# Altium footprint library Conectores.PcbLib: 55 footprints (part 1 of 4)
Each footprint in its own frame and in the unit in brackets; x right, y up, seen from the top. Pads: shape width x height; smd on the part's side, far side on the other; paste and mask are expansions set on the pad; w line width, h text height; cw(c..) or ccw(c..) is an arc to the next point about the centre after c.
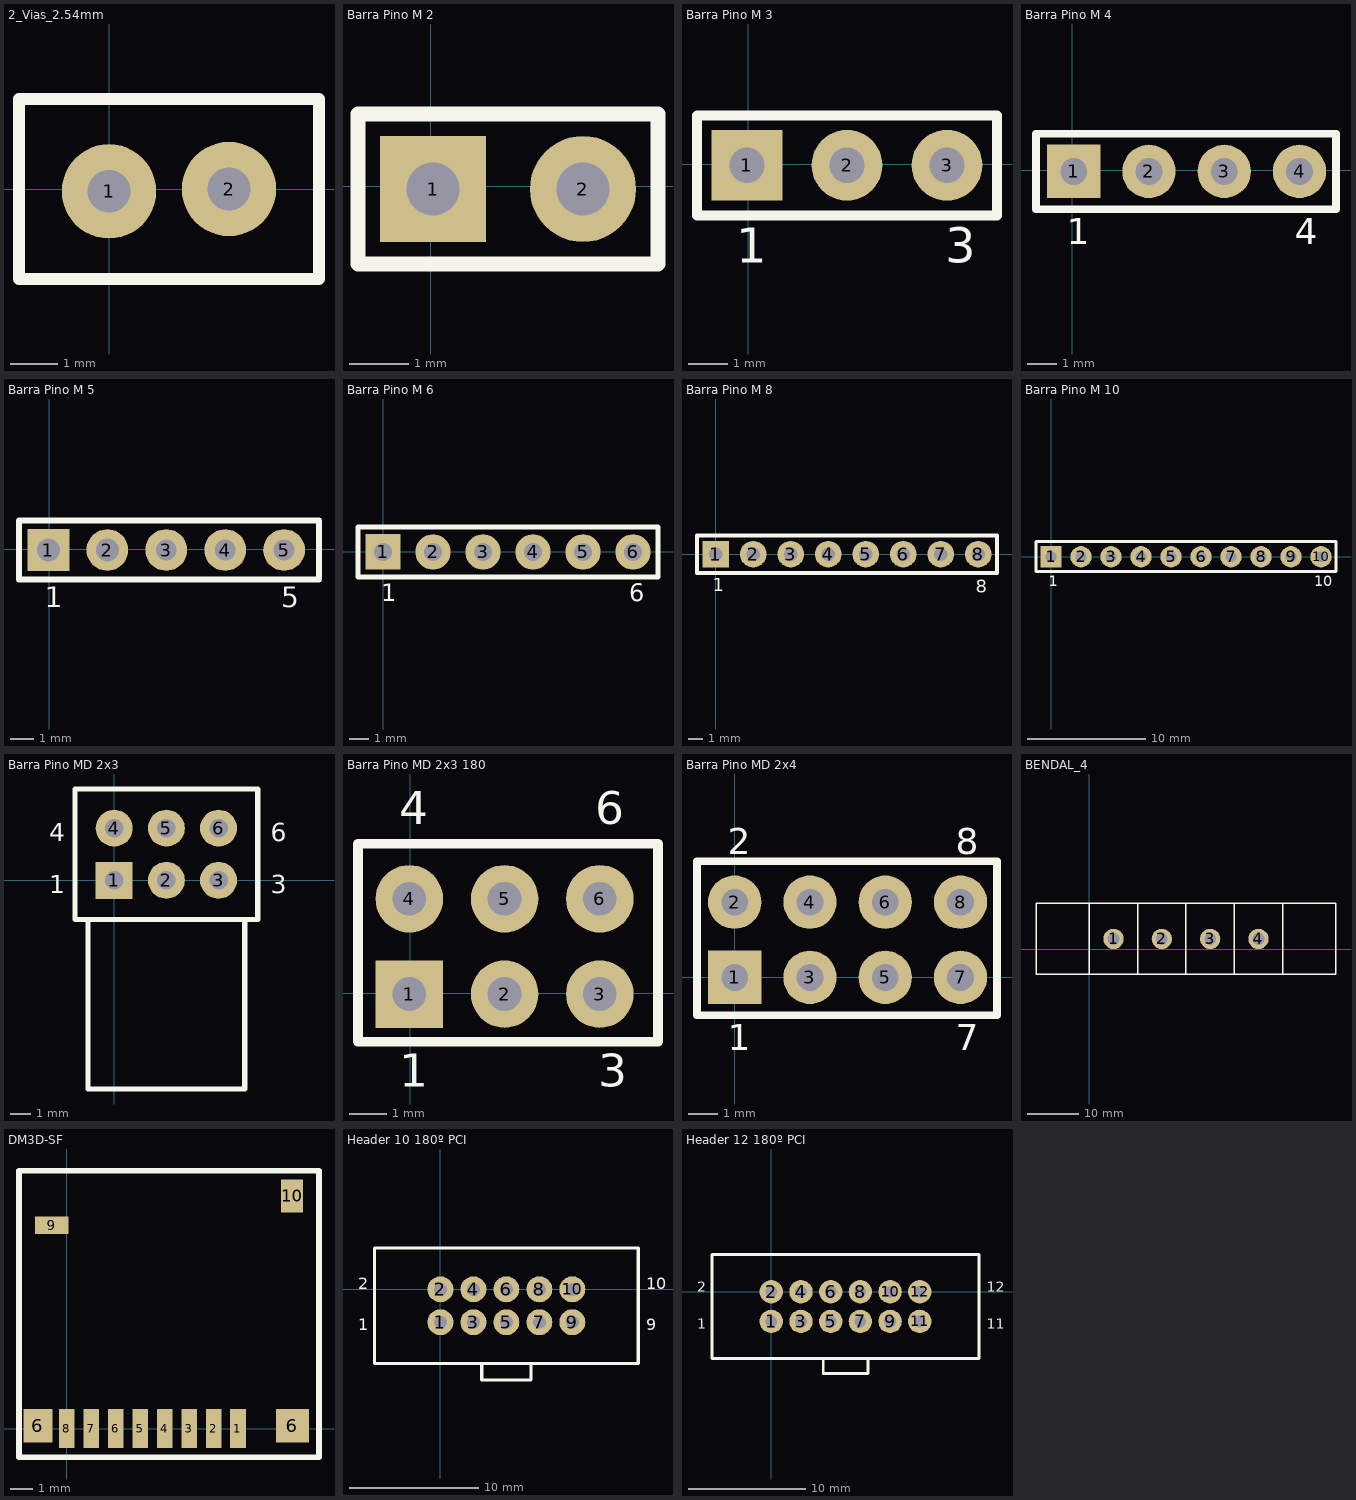
[diagram p0: the footprints below, top view; thin cyan lines are the x and y axes]

## 2_Vias_2.54mm [mm]
pads (2):
  round 2 hole 0.9: 1(0,-0.05) 2(2.54,0)
Top Overlay:
  lines w0.254: -1.905,-1.905 4.445,-1.905 4.445,1.905 -1.905,1.905 -1.905,-1.905

## Barra Pino M 2 [mm] "Barra Pinos Macho 2 Vias 2.54mm"
pads (2):
  rect 1.8x1.8 hole 0.9: 1(0.039,-0.044)
  round 1.8 hole 0.9: 2(2.579,-0.044)
Top Overlay:
  lines w0.254: -1.231,-1.314 3.849,-1.314 3.849,1.226 -1.231,1.226 -1.231,-1.314
3D body "HDR-M-1x2-2.54mm-180-11.6mm.stp": height 8.6, standoff -3, extent -1.129,-1.268 3.951,1.231

## Barra Pino M 3 [mm] "Barra Pino Macho 3 Vias 2.54mm"
pads (3):
  rect 1.8x1.8 hole 0.9: 1(-0.031,-0.025)
  round 1.8 hole 0.9: 2(2.509,-0.025) 3(5.049,-0.025)
Top Overlay:
  lines w0.254: -1.301,-1.295 6.319,-1.295 6.319,1.245 -1.301,1.245 -1.301,-1.295
  text "3" at 5,-2.5 h0.89
  text "1" at -0.3,-2.5 h0.89
3D body "HDR-M-1x3-2.54mm-180-11.6mm.stp": height 8.6, standoff -3, extent -1.199,-1.249 6.421,1.25

## Barra Pino M 4 [mm] "Barra Pinos Macho 4 Vias 2.54mm"
pads (4):
  rect 1.8x1.8 hole 0.9: 1(0.039,-0.044)
  round 1.8 hole 0.9: 2(2.579,-0.044) 3(5.119,-0.044) 4(7.659,-0.044)
Top Overlay:
  lines w0.254: -1.231,-1.314 -1.231,1.226 8.89,1.226 8.89,-1.314 -1.231,-1.314
  text "4" at 7.5,-2.5 h0.89
  text "1" at -0.2,-2.5 h0.89
3D body "HDR-M-1x2-2.54mm-180-11.6mm.stp": height 8.6, standoff -3, extent -1.129,-1.268 3.951,1.231
3D body "HDR-M-1x2-2.54mm-180-11.6mm.stp": height 8.6, standoff -3, extent 3.951,-1.268 9.031,1.231

## Barra Pino M 5 [mm] "Barra Pino Macho 5 Vias 2.54mm"
pads (5):
  rect 1.8x1.8 hole 1: 1(-0.031,-0.025)
  round 1.8 hole 1: 2(2.509,-0.025)
  round 1.8 hole 0.9: 3(5.049,-0.025) 4(7.589,-0.025) 5(10.129,-0.025)
Top Overlay:
  lines w0.254: -1.301,-1.295 11.633,-1.295 11.633,1.245 -1.301,1.245 -1.301,-1.295
  text "5" at 10,-2.5 h0.89
  text "1" at -0.2,-2.5 h0.89
3D body "HDR-M-1x2-2.54mm-180-11.6mm.stp": height 8.6, standoff -3, extent 6.401,-1.275 11.481,1.224
3D body "HDR-M-1x3-2.54mm-180-11.6mm.stp": height 8.6, standoff -3, extent -1.199,-1.249 6.421,1.25

## Barra Pino M 6 [mm] "Barra Pino Macho 6 Vias 2.54mm"
pads (6):
  rect 1.8x1.8 hole 0.9 unplated: 1(0,0)
  round 1.8 hole 0.9 unplated: 2(2.54,0) 3(5.08,0) 4(7.62,0) 5(10.16,0) 6(12.7,0)
Top Overlay:
  lines w0.254: -1.27,-1.27 13.97,-1.27 13.97,1.27 -1.27,1.27 -1.27,-1.27
  text "6" at 12.5,-2.5 h0.89
  text "1" at -0.1,-2.5 h0.89
3D body "User Library-Header_Male_6Pin.STEP": height 9.04, standoff -2.5, extent -1.27,-1.245 13.97,1.245

## Barra Pino M 8 [mm] "Barra Pino Macho 8 Vias 2.54mm"
pads (8):
  rect 1.8x1.8 hole 0.9 unplated: 1(0,0)
  round 1.8 hole 0.9 unplated: 2(2.54,0) 3(5.08,0) 4(7.62,0) 5(10.16,0) 6(12.7,0) 7(15.24,0) 8(17.78,0)
Top Overlay:
  lines w0.254: -1.27,-1.27 19.05,-1.27 19.05,1.27 -1.27,1.27 -1.27,-1.27
  text "1" at -0.2,-2.5 h0.89
  text "8" at 17.6,-2.6 h0.89
3D body "User Library-Header_Male_8Pin.STEP": height 9.04, standoff -2.5, extent -1.27,-1.245 19.05,1.245

## Barra Pino M 10 [mm] "Barra Pino Macho 10 Vias 2.54mm"
pads (10):
  rect 1.8x1.8 hole 0.9 unplated: 1(0,0)
  round 1.8 hole 0.9 unplated: 2(2.54,0) 3(5.08,0) 4(7.62,0) 5(10.16,0) 6(12.7,0) 7(15.24,0) 8(17.78,0) 9(20.32,0) 10(22.86,0)
Top Overlay:
  lines w0.254: -1.27,-1.27 -1.27,1.27 24.13,1.27 24.13,-1.27 -1.27,-1.27
  text "10" at 22.3,-2.5 h0.89
  text "1" at -0.2,-2.5 h0.89
3D body "User Library-Header_Male_10Pin.STEP": height 9.04, standoff -2.5, extent -1.27,-1.245 24.13,1.245

## Barra Pino MD 2x3 [mm]
pads (6):
  rect 1.8x1.8 hole 0.9 unplated: 1(0,0)
  round 1.8 hole 0.9 unplated: 2(2.54,0) 3(5.08,0) 4(0,2.54) 5(2.54,2.54) 6(5.08,2.54)
Top Overlay:
  lines w0.254: -1.27,-1.905 -1.27,-10.16 6.35,-10.16 6.35,-1.905 ; -1.905,-1.905 6.985,-1.905 6.985,4.445 -1.905,4.445 -1.905,-1.905
  text "1" at -3.175,-0.635 h0.89
  text "6" at 7.62,1.905 h0.89
  text "3" at 7.62,-0.635 h0.89
  text "4" at -3.175,1.905 h0.89
3D body "Barra Pino 2x3.STEP": height 5.79, standoff -1.45, extent -1.085,-9.779 6.135,2.85

## Barra Pino MD 2x3 180 [mm] "Barra Pino Macho 3 Vias 2.54mm"
pads (6):
  rect 1.8x1.8 hole 0.9: 1(-0.031,-0.025)
  round 1.8 hole 0.9: 2(2.509,-0.025) 3(5.049,-0.025) 4(-0.031,2.515) 5(2.509,2.515) 6(5.049,2.515)
Top Overlay:
  lines w0.254: -1.4,-1.295 6.6,-1.295 6.6,3.988 -1.4,3.988 -1.4,-1.295
  text "3" at 5,-2.5 h0.89
  text "1" at -0.3,-2.5 h0.89
  text "4" at -0.3,4.5 h0.89
  text "6" at 4.925,4.5 h0.89
3D body "HDR-M-1x3-2.54mm-180-11.6mm.stp": height 8.6, standoff -3, extent -1.199,-1.249 6.421,1.25
3D body "HDR-M-1x3-2.54mm-180-11.6mm.stp": height 8.6, standoff -3, extent -1.2,1.3 6.42,3.798

## Barra Pino MD 2x4 [mm] "Barra Pinos Macho 4 Vias 2.54mm"
pads (8):
  rect 1.8x1.8 hole 0.9: 1(0,0)
  round 1.8 hole 0.9: 2(0,2.54) 3(2.54,0) 4(2.54,2.54) 5(5.08,0) 6(5.08,2.54) 7(7.62,0) 8(7.62,2.54)
Top Overlay:
  lines w0.254: -1.27,-1.27 8.851,-1.27 8.851,3.919 -1.27,3.919 -1.27,-1.27
  text "8" at 7.461,4.159 h0.89
  text "2" at -0.239,4.159 h0.89
  text "1" at -0.239,-2.456 h0.89
  text "7" at 7.461,-2.456 h0.89
3D body "HDR-M-1x2-2.54mm-180-11.6mm.stp": height 8.6, standoff -3, extent -1.168,1.316 3.912,3.815
3D body "HDR-M-1x2-2.54mm-180-11.6mm.stp": height 8.6, standoff -3, extent 3.912,1.316 8.992,3.815
3D body "HDR-M-1x2-2.54mm-180-11.6mm.stp": height 8.6, standoff -3, extent 3.912,-1.224 8.992,1.275
3D body "HDR-M-1x2-2.54mm-180-11.6mm.stp": height 8.6, standoff -3, extent -1.168,-1.224 3.912,1.275

## BENDAL_4 [mm] "Conector Bendal 10A 500V 100-304 - 4 Vias"
pads (4):
  round 4 hole 2.3: 1(4.75,2) 2(14.25,2) 3(23.75,2) 4(33.25,2)
Top Overlay:
  lines w0.254: 0,-4.975 0,9 ; 3.6,9 4.125,9 ; 9.5,-4.925 9.5,9 ; 19,-4.875 19,9 ; 28.5,-5.025 28.5,8.95 ; 38,-5.025 38,8.95 ; -10.5,-4.975 -10.5,9 48.5,9 48.5,-4.975 -10.5,-4.975
3D body "CONECTOR_BENDAL (1).STEP": height 17, standoff -4, extent -9.5,-5.25 47.5,9.25

## DM3D-SF [mm]
pads (12):
  rect 0.7x1.75 smd: 1(7.7,0) 2(6.6,0) 3(5.5,0) 4(4.4,0) 5(3.3,0) 6(2.2,0) 7(1.1,0) 8(0,0)
  rect 1.3x1.5 smd: 6(-1.3,0.127)
  rect 1.5x1.5 smd: 6(10.15,0.127)
  rect 1.5x0.8 smd: 9(-0.686,9.144)
  rect 1x1.5 smd: 10(10.135,10.465)
Top Overlay:
  lines w0.254: -2.154,-1.295 11.346,-1.295 11.346,11.605 -2.154,11.605 -2.154,-1.295
3D body "DM3D-MemoryConnector.STEP": height 1.68, standoff 0.03, extent -1.252,-0.559 10.498,10.991

## ETH_PTH [mm]

## Header 10 180º PCI [mm]
pads (10):
  round 2 hole 1: 1(0,-2.54) 2(0,0) 3(2.54,-2.54) 4(2.54,0) 5(5.08,-2.54) 6(5.08,0) 7(7.62,-2.54) 8(7.62,0) 9(10.16,-2.54) 10(10.16,0)
Top Overlay:
  lines w0.254: 3.175,-5.715 3.175,-6.985 6.985,-6.985 6.985,-5.715 ; -5.08,-5.715 15.24,-5.715 15.24,3.175 -5.08,3.175 -5.08,-5.715
  text "10" at 15.875,0 h0.89
  text "9" at 15.875,-3.175 h0.89
  text "2" at -6.35,0 h0.89
  text "1" at -6.35,-3.175 h0.89
3D body "10 Vias.STEP": height 9.4, standoff -2.9, extent -5.08,-5.715 15.24,3.235

## Header 12 180º PCI [mm]
pads (12):
  round 2 hole 1: 1(0,-2.54) 2(0,0) 3(2.54,-2.54) 4(2.54,0) 5(5.08,-2.54) 6(5.08,0) 7(7.62,-2.54) 8(7.62,0) 9(10.16,-2.54) 10(10.16,0) 11(12.7,-2.54) 12(12.7,0)
Top Overlay:
  lines w0.254: 4.445,-5.715 4.445,-6.985 8.255,-6.985 8.255,-5.715 ; -5.08,-5.715 17.78,-5.715 17.78,3.175 -5.08,3.175 -5.08,-5.715
  text "12" at 18.415,0 h0.89
  text "11" at 18.415,-3.175 h0.89
  text "2" at -6.35,0 h0.89
  text "1" at -6.35,-3.175 h0.89
3D body "12 Vias.STEP": height 9.4, standoff -2.9, extent -5.08,-5.67 17.78,3.28